# Altium footprint library 0603_Led.PcbLib: 14 footprints
Each footprint in its own frame and in the unit in brackets; x right, y up, seen from the top. Pads: shape width x height; smd on the part's side, far side on the other; paste and mask are expansions set on the pad; w line width, h text height; cw(c..) or ccw(c..) is an arc to the next point about the centre after c.
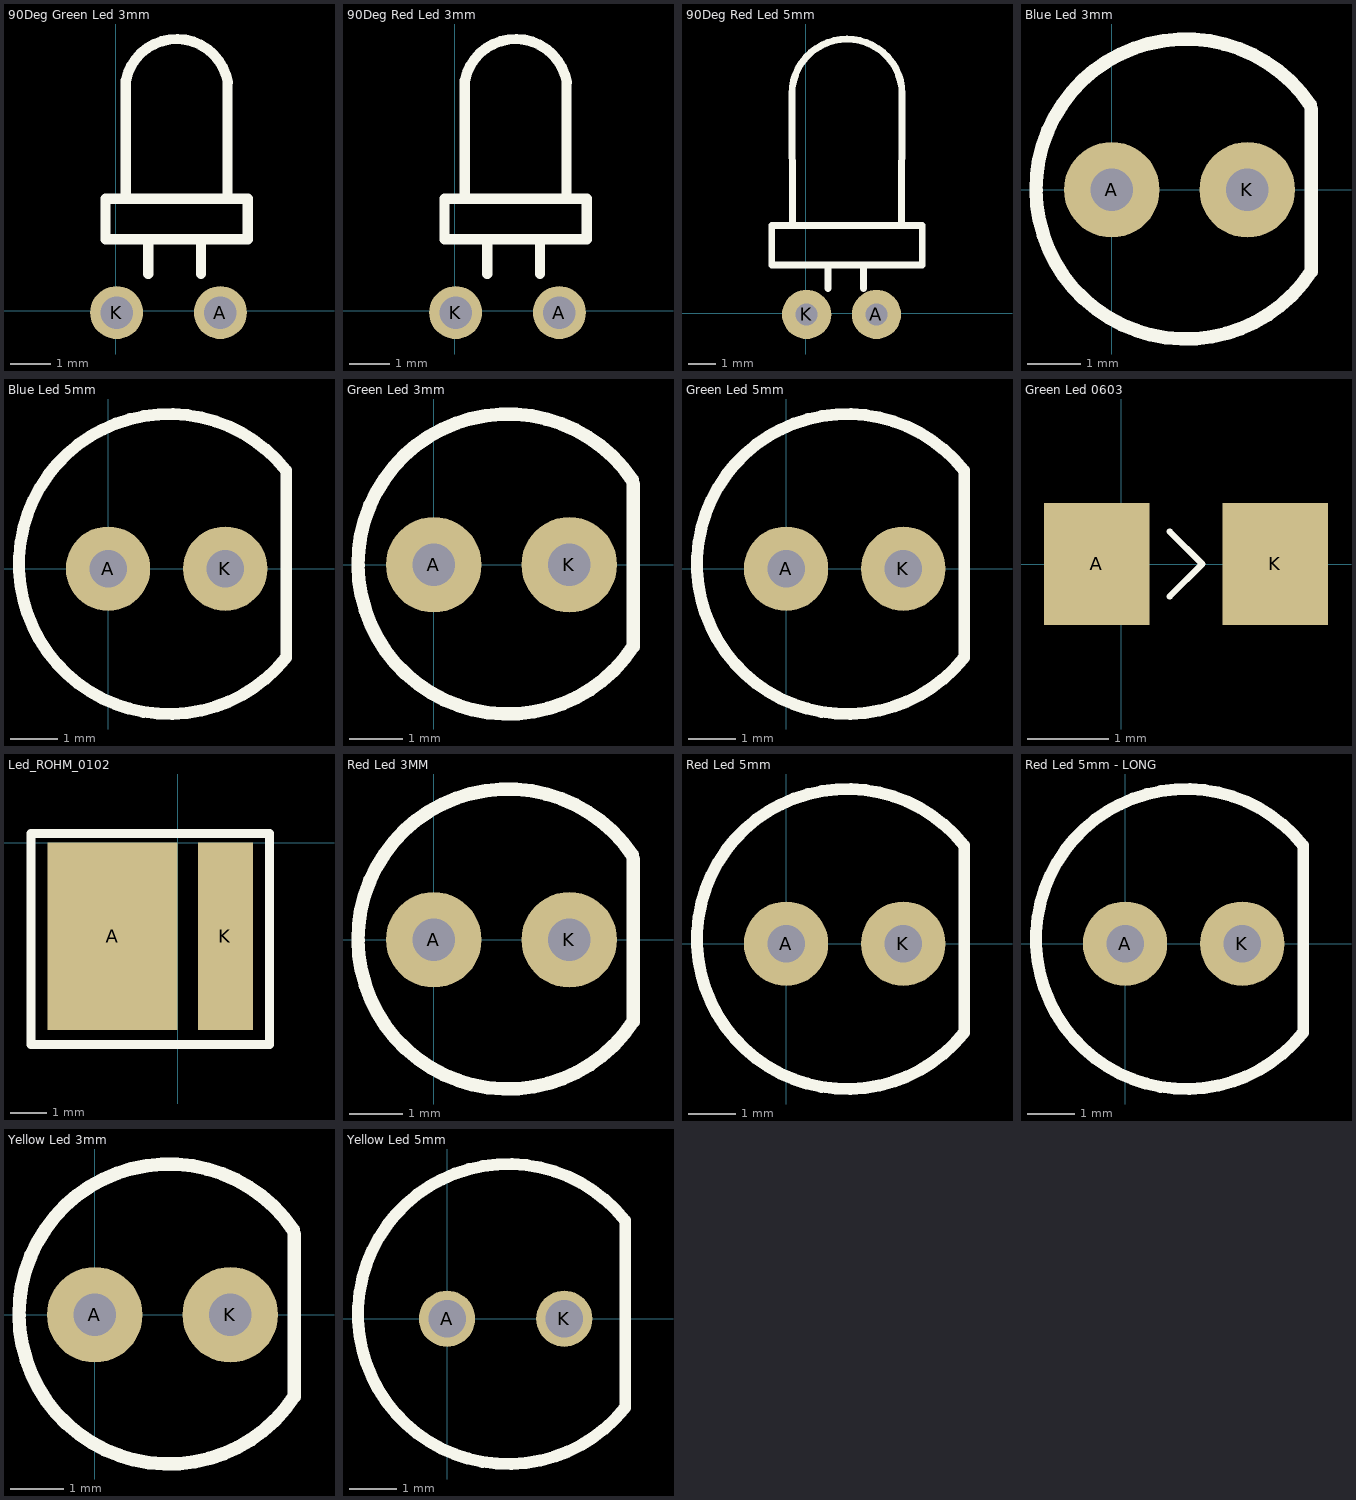
[diagram p0: the footprints below, top view; thin cyan lines are the x and y axes]

## 90Deg Green Led 3mm [mm]
pads (2):
  round 1.3 hole 0.8: A(2.575,-0.05) K(0.025,-0.05)
Top Overlay:
  lines w0.254: 0.25,2.75 0.25,5.65 cw(c1.5,5.4) 2.757,5.61 ; 0.8,0.9 0.8,1.7 ; 2.1,0.9 2.1,1.7 ; 2.75,2.75 2.75,5.61 ; -0.25,1.75 3.25,1.75 3.25,2.75 -0.25,2.75 -0.25,1.75
3D body "ALSRobot-LED GREEN 3mm V.step": height 5, standoff -1, extent -0.25,-0.302 3.3,6.45

## 90Deg Red Led 3mm [mm]
pads (2):
  round 1.3 hole 0.8: A(2.575,-0.05) K(0.025,-0.05)
Top Overlay:
  lines w0.254: 0.25,2.75 0.25,5.65 cw(c1.5,5.4) 2.757,5.61 ; 0.8,0.9 0.8,1.7 ; 2.1,0.9 2.1,1.7 ; 2.75,2.75 2.75,5.61 ; -0.25,1.75 3.25,1.75 3.25,2.75 -0.25,2.75 -0.25,1.75
3D body "ALSRobot-LED Red 3mm V.step": height 5, standoff -1, extent -0.3,-0.276 3.25,6.476

## 90Deg Red Led 5mm [mm]
pads (2):
  round 1.8 hole 0.8: A(2.575,-0.05) K(0.025,-0.05)
Top Overlay:
  lines w0.254: -0.5,3.25 -0.516,8 cw(c1.5,8) 3.516,8 3.5,3.2 ; 0.8,0.9 0.8,1.7 ; 2.1,0.9 2.1,1.7 ; -1.25,1.75 4.25,1.75 4.25,3.2 -1.25,3.2 -1.25,1.75
3D body "ALSRobot-LED Red 5mm V.step": height 7, standoff -2, extent -1.325,-0.3 4.325,10.422

## Blue Led 3mm [mm]
pads (2):
  round 1.8 hole 0.8: A(0,0) K(2.55,0)
Top Overlay:
  lines w0.254: 3.731,1.601 ccw(c1.397,0.015) 3.752,-1.54 3.752,1.512
3D body "User Library-led 3mm blue.STEP": height 5.98, standoff -1.5, extent -0.388,-1.702 2.826,1.595

## Blue Led 5mm [mm]
pads (2):
  round 1.8 hole 0.8: A(0,0) K(2.5,0)
Top Overlay:
  lines w0.254: 3.789,-1.909 cw(c1.3,0.1) 3.798,2.098 ; 3.8,-1.9 3.8,2.1
3D body "User Library-LEDd5B.STEP": height 13.81, standoff -0.99, extent -1.71,-3.01 3.71,3.01

## Green Led 3mm [mm]
pads (2):
  round 1.8 hole 0.8: A(0,0) K(2.55,0)
Top Overlay:
  lines w0.254: 3.731,1.601 ccw(c1.397,0.015) 3.752,-1.54 3.752,1.512
3D body "LED_d3-GRN_3MM.STEP": height 5.98, standoff -1.5, extent -0.394,-1.653 2.82,1.644

## Green Led 5mm [mm]
pads (2):
  round 1.8 hole 0.8: A(0,0) K(2.5,0)
Top Overlay:
  lines w0.254: 3.789,-1.909 cw(c1.3,0.1) 3.798,2.098 ; 3.8,-1.9 3.8,2.1
3D body "User Library-LEDd5G.STEP": height 13.81, standoff -0.99, extent -1.71,-3.01 3.71,3.01

## Green Led 0603 [mm] "PN 150060VS75000"
pads (2):
  rect 1.3x1.5 smd: A(-0.3,0) K(1.9,0)
Top Overlay:
  lines w0.076: 0.6,-0.4 1,0 0.6,0.4
3D body "User Library-LED_0603_G.STEP": height 0.6, standoff 0, extent 0,-0.4 1.6,0.4

## Led_ROHM_0102 [mm] "PN PSL0102WBEA1"
pads (2):
  rect 3.55x5.1 smd: A(-1.775,-2.55)
  rect 1.5x5.1 smd: K(1.3,-2.55)
Top Overlay:
  lines w0.254: -4,-5.5 -4,0.25 2.5,0.25 2.5,-5.5 -4,-5.5
3D body "LED SMD CSI.STEP": height 1.1, standoff -0.1, extent -3.25,-5.05 1.75,-0.05

## Red Led 3MM [mm]
pads (2):
  round 1.8 hole 0.8: A(0,0) K(2.55,0)
Top Overlay:
  lines w0.254: 3.731,1.601 ccw(c1.397,0.015) 3.752,-1.54 3.752,1.512
3D body "CircuitWorks-LED DIP 3MM.step": height 7.5, standoff -1, extent -0.607,-1.905 2.893,1.895

## Red Led 5mm [mm]
pads (2):
  round 1.8 hole 0.8: A(0,0) K(2.5,0)
Top Overlay:
  lines w0.254: 3.789,-1.909 cw(c1.3,0.1) 3.798,2.098 ; 3.8,-1.9 3.8,2.1
3D body "User Library-LEDd5R.STEP": height 13.81, standoff -0.99, extent -1.71,-3.01 3.71,3.01

## Red Led 5mm - LONG [mm]
pads (2):
  round 1.8 hole 0.8: A(0,0) K(2.5,0)
Top Overlay:
  lines w0.254: 3.789,-1.909 cw(c1.3,0.1) 3.798,2.098 ; 3.8,-1.9 3.8,2.1
3D body "User Library-LED 5MM-1.STEP": height 20.12, standoff -8.58, extent -1.832,-3.051 3.783,2.899

## Yellow Led 3mm [mm]
pads (2):
  round 1.8 hole 0.8: A(0,0) K(2.55,0)
Top Overlay:
  lines w0.254: 3.731,1.601 ccw(c1.397,0.015) 3.752,-1.54 3.752,1.512
3D body "User Library-led 3mm yellow.STEP": height 6.78, standoff -0.7, extent -0.394,-1.653 2.819,1.644

## Yellow Led 5mm [mm]
pads (2):
  round 1.2 hole 0.8: A(0,0) K(2.5,0)
Top Overlay:
  lines w0.254: 3.789,-1.909 cw(c1.3,0.1) 3.798,2.098 ; 3.8,-1.9 3.8,2.1
3D body "User Library-LEDd5Y.STEP": height 13.81, standoff -0.99, extent -1.71,-3.01 3.71,3.01